# EAGLE library part SA56004 (library madhu)
NXP SA56004X SMBus-compatible, 8-pin, remote/local digital temperature sensor with overtemperature alarms
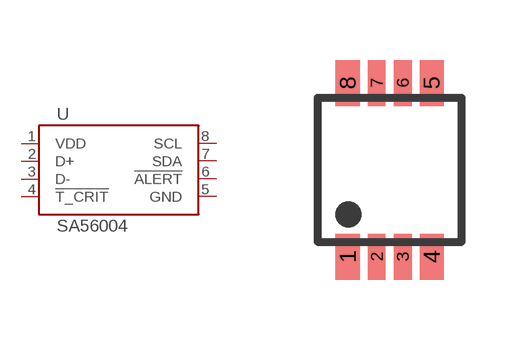
[diagram p30: symbol with the pads of SOT505-1; footprint SOT505-1]

Designator prefix U

## SA56004ADP  [SOT505-1]
1  VDD  pwr
2  D+
3  D-
4  !T_CRIT!  oc
5  GND  pwr
6  !ALERT!  oc
7  SDA  oc
8  SCL  in

## SA56004EDP  [SOT505-1]
Pads as for SOT505-1

## Footprint SOT505-1 (pad centres in mm)
Thin Shrink Small Outline Package NXP 3mm body width https://www.nxp.com/docs/en/package-information/SOT505-1.pdf
smd 0.6 x 1.15: 1 -1.05,-2.175; 4 1.05,-2.175; 5 1.05,2.175; 8 -1.05,2.175
smd 0.45 x 1.15: 2 -0.325,-2.175; 3 0.325,-2.175; 6 0.325,2.175; 7 -0.325,2.175